# Altium integrated library StudentsLibrary.IntLib: 806 symbols (part 4 of 10)
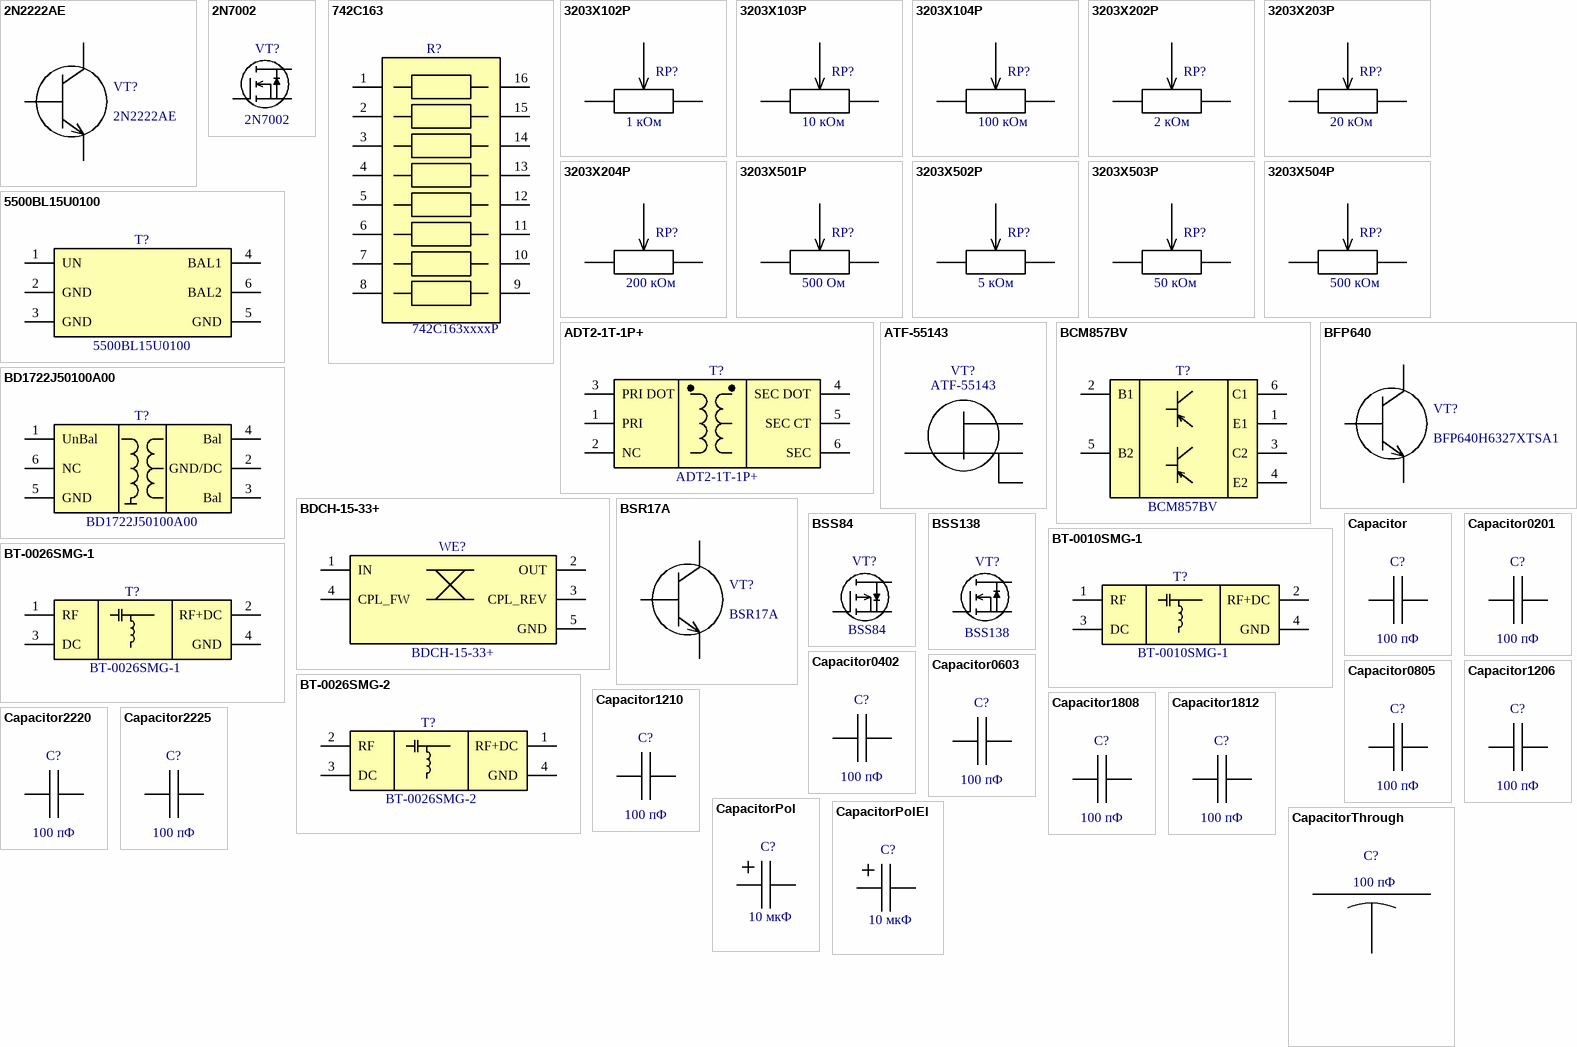
[diagram p50: symbols 2N2222AE to CapacitorThrough]

## Capacitor0603
designator C?, comment 100 пФ
Capacitor, chip, 0603; Value: 100 пФ; PartNumber: *; Tolerance: *; VDC: *; Dielectric: *; Manufacturer: *; Package: 0603
footprint CAPC160X80X90L30N (Capacitor, Chip; 1.60 mm L X 0.80 mm W X 0.90 mm H body)
pins: 1, 2

## Capacitor0805
designator C?, comment 100 пФ
Capacitor, chip, 0805; Value: 100 пФ; PartNumber: *; Tolerance: *; VDC: *; Dielectric: *; Manufacturer: *; Package: 0805
footprint CAPC200X125X95L50N (Capacitor, Chip; 2.00 mm L X 1.25 mm W X 0.95 mm H body)
pins: 1, 2

## Capacitor1206
designator C?, comment 100 пФ
Capacitor, chip, 1206; Value: 100 пФ; PartNumber: *; Tolerance: *; VDC: *; Dielectric: *; Manufacturer: *; Package: 1206
footprint CAPC320X160X180L20N (Capacitor, Chip; 3.20 mm L X 1.60 mm W X 1.80 mm H body)
pins: 1, 2

## Capacitor1210
designator C?, comment 100 пФ
Capacitor, chip, 1210; Value: 100 пФ; PartNumber: *; Tolerance: *; VDC: *; Dielectric: *; Manufacturer: *; Package: 1210
footprint CAPC320X250X280L20N (Capacitor, Chip; 3.20 mm L X 2.50 mm W X 2.80 mm H body)
pins: 1, 2

## Capacitor1808
designator C?, comment 100 пФ
Capacitor, chip, 1808; Value: 100 пФ; PartNumber: *; Tolerance: *; VDC: *; Dielectric: *; Manufacturer: *; Package: 1808
footprint CAPC470X200X115L60N (Capacitor, Chip; 4.70 mm L X 2.00 mm W X 1.15 mm H body)
pins: 1, 2

## Capacitor1812
designator C?, comment 100 пФ
Capacitor, chip, 1812; Value: 100 пФ; PartNumber: *; Tolerance: *; VDC: *; Dielectric: *; Manufacturer: *; Package: 1812
footprint CAPC450X320X360L20N (Capacitor, Chip; 4.50 mm L X 3.20 mm W X 3.60 mm H body)
pins: 1, 2

## Capacitor2220
designator C?, comment 100 пФ
Capacitor, chip, 2220; Value: 100 пФ; PartNumber: *; Tolerance: *; VDC: *; Dielectric: *; Manufacturer: *; Package: 2220
footprint CAPC570X500X310L20N (Capacitor, Chip; 5.70 mm L X 5.00 mm W X 3.10 mm H body)
pins: 1, 2

## Capacitor2225
designator C?, comment 100 пФ
Capacitor, chip, 2225; Value: 100 пФ; PartNumber: *; Tolerance: *; VDC: *; Dielectric: *; Manufacturer: *; Package: 2225
footprint CAPC560X640X155L60N (Capacitor, Chip; 5.60 mm L X 6.40 mm W X 1.55 mm H body)
pins: 1, 2

## CapacitorPol
designator C?, comment 10 мкФ
Capacitor, Pol, generic; Value: 10 мкФ; PartNumber: *; Tolerance: *; VDC: *; Manufacturer: *; Package: 1206; ESR: *
footprint CAPPM320X160X180L80X120N (Capacitor, Polarized, Molded Body; 2.60 mm L X 1.60 mm W X 1.80 mm H body)
footprint CAPPM350X280X210L80X220N (Capacitor, Polarized, Molded Body; 2.90 mm L X 2.80 mm W X 2.10 mm H body)
footprint CAPPM600X320X280L130X240N (Capacitor, Polarized, Molded Body; 5.80 mm L X 3.20 mm W X 2.80 mm H body)
footprint CAPPM730X430X310L130X240N (Capacitor, Polarized, Molded Body; 7.10 mm L X 4.30 mm W X 3.10 mm H body)
pins: 1, 2

## CapacitorPolEl
designator C?, comment 10 мкФ
Capacitor, Pol, El, generic; Value: 10 мкФ; PartNumber: *; Tolerance: *; VDC: *; Manufacturer: *; Package: *; ESR: *
footprint CAPAE430X600D510L205X65N (Capacitor, Aluminum Electrolytic; 4.30 mm L X 4.30 mm W X 6.00 mm H body)
footprint CAPAE530X600D590L220X65N (Capacitor, Aluminum Electrolytic; 5.30 mm L X 5.30 mm W X 6.00 mm H body)
footprint CAPAE840X680D840L305X65N (Capacitor, Aluminum Electrolytic; 8.40 mm L X 8.40 mm W X 6.80 mm H body)
footprint CAPAE1030X1050D1200L350X90N (Capacitor, Aluminum Electrolytic; 10.30 mm L X 10.30 mm W X 10.50 mm H body)
footprint CAPAE660X610L260X65 (Capacitor, Aluminum Electrolytic; 6.60 mm L X 6.60 mm W X 6.10 mm H body)
footprint CAPAE830X700D900L290X70N (Capacitor, Aluminum Electrolytic; 8.30 mm L X 8.30 mm W X 7.00 mm H body)
pins: 1, 2

## CapacitorThrough
designator C?, comment 100 пФ
Capacitor, through, 3-terminal; Value: 100 пФ; PartNumber: *; Tolerance: *; VDC: *; Dielectric: *; Manufacturer: *; Package: 0402
footprint CAPCAF4P0_100X50X50L15X35N (Chip Array, 4 Side Flat, 0.00 mm pitch; rect., 1 pin X 1 pin, 1.00 mm L X 0.50 mm W X 0.50 mm H body)
footprint CAPCAF4P0_120X90X80L20X50N (Chip Array, 4 Side Flat, 0.00 mm pitch; rect., 1 pin X 1 pin, 1.20 mm L X 0.90 mm W X 0.80 mm H body)
footprint CAPCAF4P0_160X80X70L20X40N (Chip Array, 4 Side Flat, 0.00 mm pitch; rect., 1 pin X 1 pin, 1.60 mm L X 0.80 mm W X 0.70 mm H body)
footprint CAPCAF4P0_200X125X95L25X60N (Chip Array, 4 Side Flat, 0.00 mm pitch; rect., 1 pin X 1 pin, 2.00 mm L X 1.25 mm W X 0.95 mm H body)
footprint CAPCAF4P0_320X160X150L30X110N (Chip Array, 4 Side Flat, 0.00 mm pitch; rect., 1 pin X 1 pin, 3.20 mm L X 1.60 mm W X 1.50 mm H body)
footprint CAPCAF4P0_450X160X120L35X150N (Chip Array, 4 Side Flat, 0.00 mm pitch; rect., 1 pin X 1 pin, 4.50 mm L X 1.60 mm W X 1.20 mm H body)
pins: 1, 2, 3

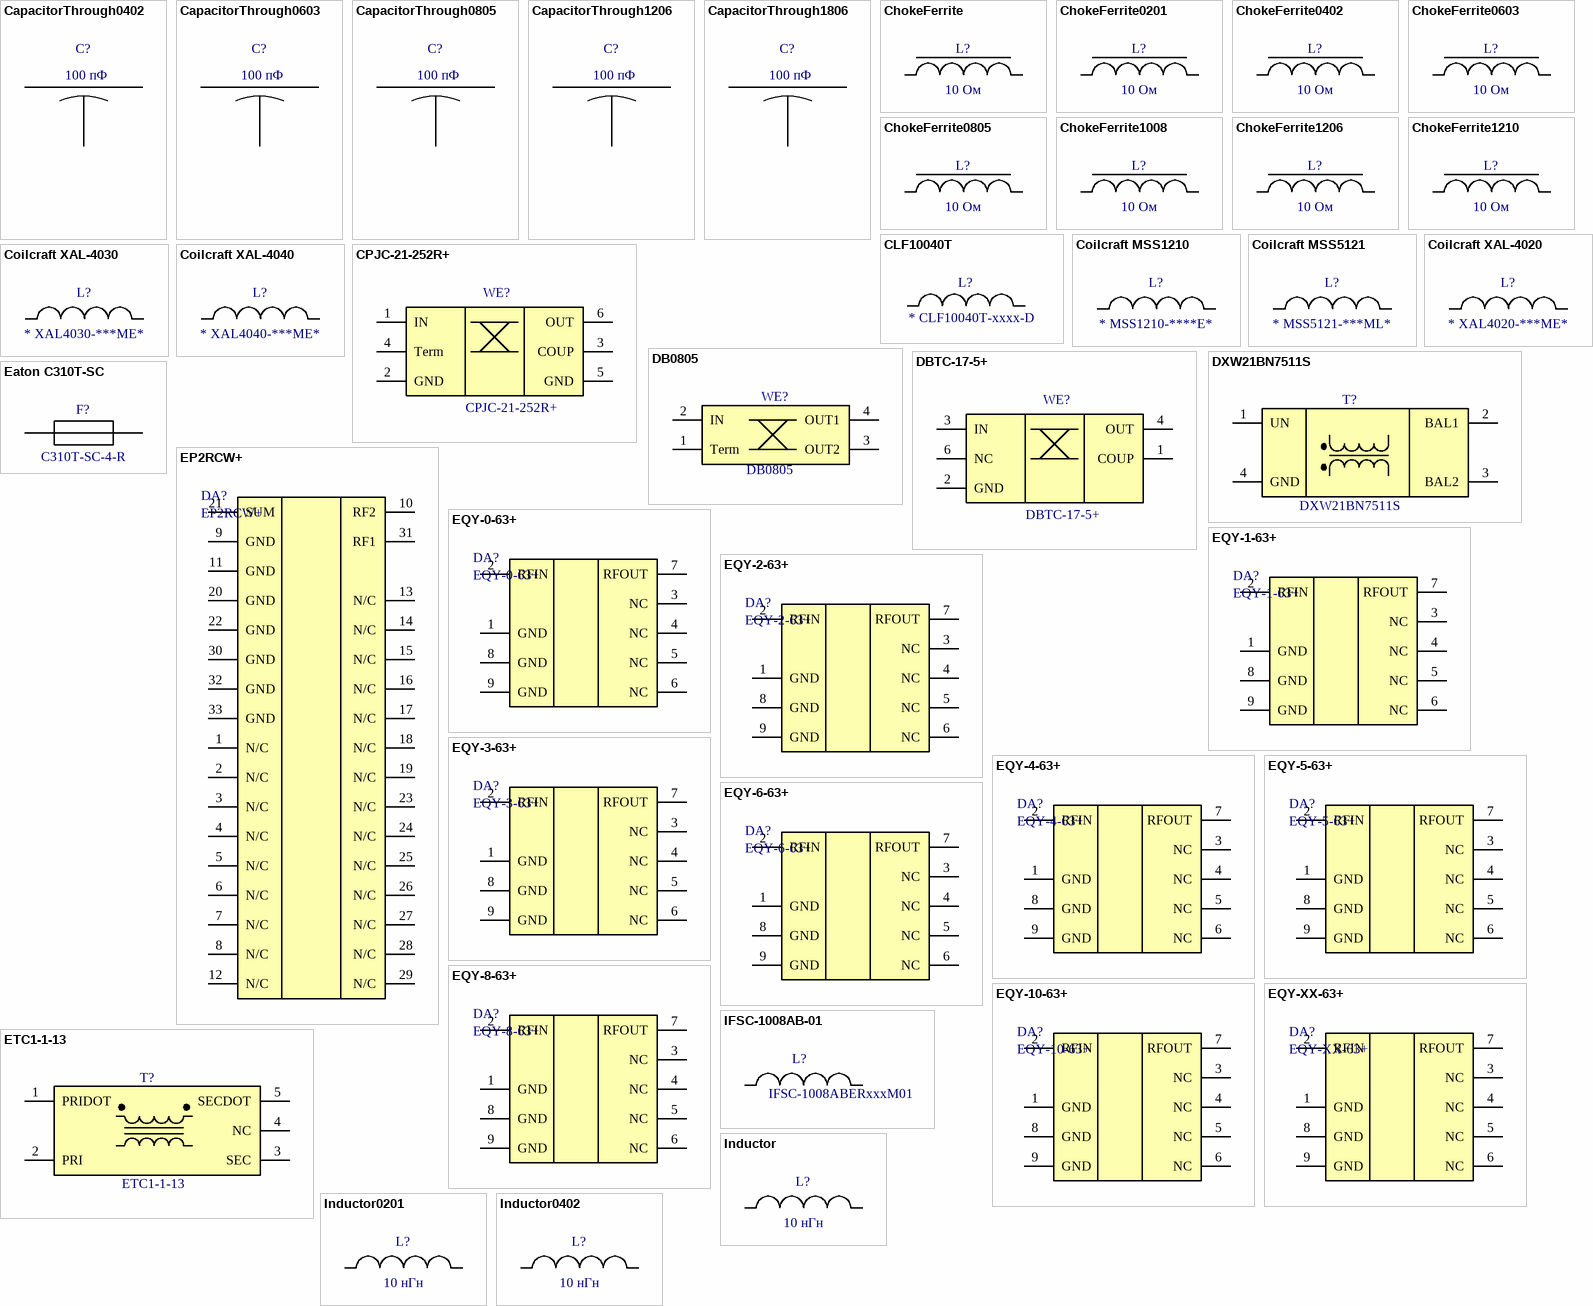
[diagram p12: symbols CapacitorThrough0402 to Inductor0402]

## CapacitorThrough0402
designator C?, comment 100 пФ
Capacitor, through, 3-terminal, 0402; Value: 100 пФ; PartNumber: *; Tolerance: *; VDC: *; Dielectric: *; Manufacturer: *; Package: 0402
footprint CAPCAF4P0_100X50X50L15X35N (Chip Array, 4 Side Flat, 0.00 mm pitch; rect., 1 pin X 1 pin, 1.00 mm L X 0.50 mm W X 0.50 mm H body)
pins: 1, 2, 3

## CapacitorThrough0603
designator C?, comment 100 пФ
Capacitor, through, 3-terminal, 0603; Value: 100 пФ; PartNumber: *; Tolerance: *; VDC: *; Dielectric: *; Manufacturer: *; Package: 0603
footprint CAPCAF4P0_160X80X70L20X40N (Chip Array, 4 Side Flat, 0.00 mm pitch; rect., 1 pin X 1 pin, 1.60 mm L X 0.80 mm W X 0.70 mm H body)
pins: 1, 2, 3

## CapacitorThrough0805
designator C?, comment 100 пФ
Capacitor, through, 3-terminal, 0805; Value: 100 пФ; PartNumber: *; Tolerance: *; VDC: *; Dielectric: *; Manufacturer: *; Package: 0805
footprint CAPCAF4P0_200X125X95L25X60N (Chip Array, 4 Side Flat, 0.00 mm pitch; rect., 1 pin X 1 pin, 2.00 mm L X 1.25 mm W X 0.95 mm H body)
pins: 1, 2, 3

## CapacitorThrough1206
designator C?, comment 100 пФ
Capacitor, through, 3-terminal, 1206; Value: 100 пФ; PartNumber: *; Tolerance: *; VDC: *; Dielectric: *; Manufacturer: *; Package: 1206
footprint CAPCAF4P0_320X160X150L30X110N (Chip Array, 4 Side Flat, 0.00 mm pitch; rect., 1 pin X 1 pin, 3.20 mm L X 1.60 mm W X 1.50 mm H body)
pins: 1, 2, 3

## CapacitorThrough1806
designator C?, comment 100 пФ
Capacitor, through, 3-terminal, 1806; Value: 100 пФ; PartNumber: *; Tolerance: *; VDC: *; Dielectric: *; Manufacturer: *; Package: 1806
footprint CAPCAF4P0_450X160X120L35X150N (Chip Array, 4 Side Flat, 0.00 mm pitch; rect., 1 pin X 1 pin, 4.50 mm L X 1.60 mm W X 1.20 mm H body)
pins: 1, 2, 3

## ChokeFerrite
designator L?, comment 10 Ом
Choke, Ferrite Core, SMD; Value: 10 Ом; PartNumber: *; Tolerance: *; DCR: *; IRMS: *; DCI: *; Manufacturer: *; Package: 0402
footprint BEADC60X30X33L10N (Ferrite Bead, Chip; 0.60 mm L X 0.30 mm W X 0.33 mm H body)
footprint BEADC100X50X55L20N (Ferrite Bead, Chip; 1.00 mm L X 0.50 mm W X 0.55 mm H body)
footprint BEADC160X80X100L30N (Ferrite Bead, Chip; 1.60 mm L X 0.80 mm W X 1.00 mm H body)
footprint BEADC200X125X105L50N (Ferrite Bead, Chip; 2.00 mm L X 1.25 mm W X 1.05 mm H body)
footprint BEADC250X200X100L50N (Ferrite Bead, Chip; 2.50 mm L X 2.00 mm W X 1.00 mm H body)
footprint BEADC320X160X180L70N (Ferrite Bead, Chip; 3.20 mm L X 1.60 mm W X 1.80 mm H body)
footprint BEADC320X250X170L70N (Ferrite Bead, Chip; 3.20 mm L X 2.50 mm W X 1.70 mm H body)
pins: 1, 2

## ChokeFerrite0201
designator L?, comment 10 Ом
Choke, Ferrite Core, SMD, 0201; Value: 10 Ом; PartNumber: *; Tolerance: *; DCR: *; IRMS: *; DCI: *; Manufacturer: *; Package: 0201
footprint BEADC60X30X33L10N (Ferrite Bead, Chip; 0.60 mm L X 0.30 mm W X 0.33 mm H body)
pins: 1, 2

## ChokeFerrite0402
designator L?, comment 10 Ом
Choke, Ferrite Core, SMD, 0402; Value: 10 Ом; PartNumber: *; Tolerance: *; DCR: *; IRMS: *; DCI: *; Manufacturer: *; Package: 0402
footprint BEADC100X50X55L20N (Ferrite Bead, Chip; 1.00 mm L X 0.50 mm W X 0.55 mm H body)
pins: 1, 2

## ChokeFerrite0603
designator L?, comment 10 Ом
Choke, Ferrite Core, SMD, 0603; Value: 10 Ом; PartNumber: *; Tolerance: *; DCR: *; IRMS: *; DCI: *; Manufacturer: *; Package: 0603
footprint BEADC160X80X100L30N (Ferrite Bead, Chip; 1.60 mm L X 0.80 mm W X 1.00 mm H body)
pins: 1, 2

## ChokeFerrite0805
designator L?, comment 10 Ом
Choke, Ferrite Core, SMD, 0805; Value: 10 Ом; PartNumber: *; Tolerance: *; DCR: *; IRMS: *; DCI: *; Manufacturer: *; Package: 0805
footprint BEADC200X125X105L50N (Ferrite Bead, Chip; 2.00 mm L X 1.25 mm W X 1.05 mm H body)
pins: 1, 2

## ChokeFerrite1008
designator L?, comment 10 Ом
Choke, Ferrite Core, SMD, 1008; Value: 10 Ом; PartNumber: *; Tolerance: *; DCR: *; IRMS: *; DCI: *; Manufacturer: *; Package: 1008
footprint BEADC250X200X100L50N (Ferrite Bead, Chip; 2.50 mm L X 2.00 mm W X 1.00 mm H body)
pins: 1, 2

## ChokeFerrite1206
designator L?, comment 10 Ом
Choke, Ferrite Core, SMD, 1206; Value: 10 Ом; PartNumber: *; Tolerance: *; DCR: *; IRMS: *; DCI: *; Manufacturer: *; Package: 1206
footprint BEADC320X160X180L70N (Ferrite Bead, Chip; 3.20 mm L X 1.60 mm W X 1.80 mm H body)
pins: 1, 2

## ChokeFerrite1210
designator L?, comment 10 Ом
Choke, Ferrite Core, SMD, 1210; Value: 10 Ом; PartNumber: *; Tolerance: *; DCR: *; IRMS: *; DCI: *; Manufacturer: *; Package: 1210
footprint BEADC320X250X170L70N (Ferrite Bead, Chip; 3.20 mm L X 2.50 mm W X 1.70 mm H body)
pins: 1, 2

## CLF10040T
designator L?, comment * CLF10040T-xxxx-D
Inductors for power circuits, Wound ferrite, CLF-D series (for automotive); Manufacturer: Coilcraft; Value: *; Tolerance: *; DCR: *; ISAT: *; IRMS: *; PartNumber: CLF10040T-xxxx-D
footprint COILCRAFT_CLF10040-D (Coilcraft 10x9.7x3.8 shileded inductor)
pins: 1, 2

## Coilcraft MSS1210
designator L?, comment * MSS1210-****E*
Coilcraft Shielded Power Inductors, 12.3x12.3x10; Value: *; PartNumber: MSS1210-****E*; Tolerance: *; DCR: *; IRMS: *; ISAT: *; SRF: *; Manufacturer: Coilcraft
footprint COILCRAFT_MSS1210 (Coilcraft Shielded Power Inductors, 12.3x12.3x10)
pins: 1, 2

## Coilcraft MSS5121
designator L?, comment * MSS5121-***ML*
MSS5121 Series Shielded Surface Mount Power Inductors, 5.1x5.1x2.2; Manufacturer: Coilcraft; Tolerance: ±20%; Value: *; PartNumber: MSS5121-***ML*; DCR: *; IRMS: *; ISAT: *; SRF: *
footprint Coilcraft MSS5121 (MSS5121 Series Shielded Surface Mount Power Inductors, 5.1x5.1x2.2)
pins: 1, 2

## Coilcraft XAL-4020
designator L?, comment * XAL4020-***ME*
Coilcraft Shielded Power Inductor, 4x4x2; Tolerance: ±20%; Value: *; PartNumber: XAL4020-***ME*; DCR: *; IRMS: *; ISAT: *; SRF: *; Manufacturer: Coilcraft
footprint COILCRAFT_XAL4020 (Coilcraft Power Inductor, 4x4x2)
pins: 1, 2

## Coilcraft XAL-4030
designator L?, comment * XAL4030-***ME*
Coilcraft Shielded Power Inductor, 4x4x3; Tolerance: ±20%; Value: *; PartNumber: XAL4030-***ME*; DCR: *; IRMS: *; ISAT: *; SRF: *; Manufacturer: Coilcraft
footprint COILCRAFT_XAL4030 (Coilcraft Power Inductor, 4x4x3)
pins: 1, 2

## Coilcraft XAL-4040
designator L?, comment * XAL4040-***ME*
Coilcraft Shielded Power Inductor, 4x4x4; Tolerance: ±20%; Value: *; PartNumber: XAL4040-***ME*; DCR: *; IRMS: *; ISAT: *; SRF: *; Manufacturer: Coilcraft
footprint COILCRAFT_XAL4040 (Coilcraft Power Inductor, 4x4x4)
pins: 1, 2

## CPJC-21-252R+
designator WE?
Directional Coupler 50Ω, 17dB coupling, 50 to 2000 MHz; Manufacturer: Mini-Circuits; PartNumber: CPJC-21-252R+; ComponentLink1Description: Product Page; ComponentLink1URL: https://www.minicircuits.com/WebStore/dashboard.html?model=CPJC-21-252R%2B; ComponentLink2Description: DataSheet; ComponentLink2URL: https://www.minicircuits.com/WebStore/dashboardPdf?model=CPJC-21-252R%2B
footprint JC0603C (Mini-Circuits CASE JC0603C)
pins: 1 IN, 2 GND, 3 COUP, 4 Term, 5 GND, 6 OUT

## DB0805
designator WE?
Thin-Film Directional Coupler 3dB 90°; Manufacturer: Kyocera AVX; PartNumber: DB0805; ComponentLink1Description: Product Page; ComponentLink1URL: https://www.kyocera-avx.com/products/rfmicrowave/couplers/db0805/
footprint AVXRF DB0805 (AVX RF case DB0805)
pins: 1 Term, 2 IN, 3 OUT2, 4 OUT1

## DBTC-17-5+
designator WE?
Directional Coupler 50Ω, 17dB coupling, 50 to 2000 MHz; Manufacturer: Mini-Circuits; PartNumber: DBTC-17-5+; ComponentLink1Description: Product Page; ComponentLink1URL: https://www.minicircuits.com/WebStore/dashboard.html?model=DBTC-17-5%2B; ComponentLink2Description: DataSheet; ComponentLink2URL: https://www.minicircuits.com/WebStore/dashboardPdf?model=DBTC-17-5%2B
footprint AT790-1 (Mini-Circuirts case AT790-1)
pins: 1 COUP, 2 GND, 3 IN, 4 OUT, 6 NC

## DXW21BN7511S
designator T?
Ultra miniature size and wire wound type microchip / transformer. 2.0x1.2x1.2mm; Manufacturer: Murata; PartNumber: DXW21BN7511S; ComponentLink1Description: ProductPage; ComponentLink1URL: https://www.murata.com/en-eu/products/productdetail?partno=DXW21BN7511S%23; ComponentLink2Description: DataSheet; ComponentLink2URL: https://www.murata.com/products/productdata/8796776267806/EFKA0001.pdf?1655782219000
footprint DXW21BN7511S (Murata 2012 4-terminal)
pins: 1 UN, 2 BAL1, 3 BAL2, 4 GND

## Eaton C310T-SC
designator F?, comment C310T-SC-4-R
Fuse Subminiature Slow Blow Acting 4A 250V Axial 3.6 X 10mm Ceramic; Manufacturer: Eaton; PartNumber: C310T-SC-4-R; ComponentLink1Description: Product Page; ComponentLink1URL: https://www.eaton.com/gb/en-gb/catalog/electronic-components/c310t-sc-fuse.specifications.html
footprint EATON C310T-SC (3.6 mm x 10 mm pitch 13.5 mm)
pins: 1, 2

## EP2RCW+
designator DA?
2 Ways MMIC Power Splitter, DC - 8000 MHz, 50Ω; Manufacturer: Mini-Circuits; PartNumber: EP2RCW+; ComponentLink1Description: Product Page; ComponentLink1URL: https://www.minicircuits.com/WebStore/dashboard.html?model=EP2RCW%2B; ComponentLink2Description: DataSheet; ComponentLink2URL: https://www.minicircuits.com/WebStore/dashboardPdf?model=EP2RCW%2B
footprint QFN33P50_500X500X100L40X24T380N (Quad Flat No-Lead (QFN with Tab), 0.50 mm pitch; square, 8 pin X 8 pin, 5.00 mm L X 5.00 mm W X 1.00 mm H body)
pins: 1 N/C, 2 N/C, 3 N/C, 4 N/C, 5 N/C, 6 N/C, 7 N/C, 8 N/C, 9 GND, 10 RF2, 11 GND, 12 N/C, 13 N/C, 14 N/C, 15 N/C, 16 N/C, 17 N/C, 18 N/C, 19 N/C, 20 GND, 21 SUM, 22 GND, 23 N/C, 24 N/C, 25 N/C, 26 N/C, 27 N/C, 28 N/C, 29 N/C, 30 GND, 31 RF1, 32 GND, 33 GND

## EQY-0-63+
designator DA?
-0.1 dB SMT Fixed Slope Equalizer, DC - 6000 MHz; Manufacturer: Mini-Circuits; PartNumber: EQY-0-63+; ComponentLink2Description: DataSheet; ComponentLink1Description: Product Page; ComponentLink1URL: https://www.minicircuits.com/WebStore/dashboard.html?model=EQY-0-63%2B; ComponentLink2URL: https://www.minicircuits.com/WebStore/dashboardPdf?model=EQY-0-63%2B
footprint SON9P50_200X200X100L35X23T120X60N (Small Outline No-Lead (SON with Tab), 0.50 mm pitch; 8 pin, 2.00 mm L X 2.00 mm W X 1.00 mm H body)
pins: 1 GND, 2 RFIN, 3 NC, 4 NC, 5 NC, 6 NC, 7 RFOUT, 8 GND, 9 GND

## EQY-1-63+
designator DA?
1.2 dB SMT Fixed Slope Equalizer, DC - 6000 MHz; Manufacturer: Mini-Circuits; PartNumber: EQY-1-63+; ComponentLink2Description: DataSheet; ComponentLink1Description: Product Page; ComponentLink1URL: https://www.minicircuits.com/WebStore/dashboard.html?model=EQY-1-63%2B; ComponentLink2URL: https://www.minicircuits.com/WebStore/dashboardPdf?model=EQY-1-63%2B
footprint SON9P50_200X200X100L35X23T120X60N (Small Outline No-Lead (SON with Tab), 0.50 mm pitch; 8 pin, 2.00 mm L X 2.00 mm W X 1.00 mm H body)
pins: 1 GND, 2 RFIN, 3 NC, 4 NC, 5 NC, 6 NC, 7 RFOUT, 8 GND, 9 GND

## EQY-2-63+
designator DA?
2.1 dB SMT Fixed Slope Equalizer, DC - 6000 MHz; Manufacturer: Mini-Circuits; PartNumber: EQY-2-63+; ComponentLink2Description: DataSheet; ComponentLink1Description: Product Page; ComponentLink1URL: https://www.minicircuits.com/WebStore/dashboard.html?model=EQY-2-63%2B; ComponentLink2URL: https://www.minicircuits.com/WebStore/dashboardPdf?model=EQY-2-63%2B
footprint SON9P50_200X200X100L35X23T120X60N (Small Outline No-Lead (SON with Tab), 0.50 mm pitch; 8 pin, 2.00 mm L X 2.00 mm W X 1.00 mm H body)
pins: 1 GND, 2 RFIN, 3 NC, 4 NC, 5 NC, 6 NC, 7 RFOUT, 8 GND, 9 GND

## EQY-3-63+
designator DA?
3.2 dB SMT Fixed Slope Equalizer, DC - 6000 MHz; Manufacturer: Mini-Circuits; PartNumber: EQY-3-63+; ComponentLink2Description: DataSheet; ComponentLink1Description: Product Page; ComponentLink1URL: https://www.minicircuits.com/WebStore/dashboard.html?model=EQY-3-63%2B; ComponentLink2URL: https://www.minicircuits.com/WebStore/dashboardPdf?model=EQY-3-63%2B
footprint SON9P50_200X200X100L35X23T120X60N (Small Outline No-Lead (SON with Tab), 0.50 mm pitch; 8 pin, 2.00 mm L X 2.00 mm W X 1.00 mm H body)
pins: 1 GND, 2 RFIN, 3 NC, 4 NC, 5 NC, 6 NC, 7 RFOUT, 8 GND, 9 GND

## EQY-4-63+
designator DA?
4.2 dB SMT Fixed Slope Equalizer, DC - 6000 MHz; Manufacturer: Mini-Circuits; PartNumber: EQY-4-63+; ComponentLink2Description: DataSheet; ComponentLink1Description: Product Page; ComponentLink1URL: https://www.minicircuits.com/WebStore/dashboard.html?model=EQY-4-63%2B; ComponentLink2URL: https://www.minicircuits.com/WebStore/dashboardPdf?model=EQY-4-63%2B
footprint SON9P50_200X200X100L35X23T120X60N (Small Outline No-Lead (SON with Tab), 0.50 mm pitch; 8 pin, 2.00 mm L X 2.00 mm W X 1.00 mm H body)
pins: 1 GND, 2 RFIN, 3 NC, 4 NC, 5 NC, 6 NC, 7 RFOUT, 8 GND, 9 GND

## EQY-5-63+
designator DA?
5 dB SMT Fixed Slope Equalizer, DC - 6000 MHz; Manufacturer: Mini-Circuits; PartNumber: EQY-5-63+; ComponentLink2Description: DataSheet; ComponentLink1Description: Product Page; ComponentLink1URL: https://www.minicircuits.com/WebStore/dashboard.html?model=EQY-5-63%2B; ComponentLink2URL: https://www.minicircuits.com/WebStore/dashboardPdf?model=EQY-5-63%2B
footprint SON9P50_200X200X100L35X23T120X60N (Small Outline No-Lead (SON with Tab), 0.50 mm pitch; 8 pin, 2.00 mm L X 2.00 mm W X 1.00 mm H body)
pins: 1 GND, 2 RFIN, 3 NC, 4 NC, 5 NC, 6 NC, 7 RFOUT, 8 GND, 9 GND

## EQY-6-63+
designator DA?
6.5 dB SMT Fixed Slope Equalizer, DC - 6000 MHz; Manufacturer: Mini-Circuits; PartNumber: EQY-6-63+; ComponentLink2Description: DataSheet; ComponentLink1Description: Product Page; ComponentLink1URL: https://www.minicircuits.com/WebStore/dashboard.html?model=EQY-6-63%2B; ComponentLink2URL: https://www.minicircuits.com/WebStore/dashboardPdf?model=EQY-6-63%2B
footprint SON9P50_200X200X100L35X23T120X60N (Small Outline No-Lead (SON with Tab), 0.50 mm pitch; 8 pin, 2.00 mm L X 2.00 mm W X 1.00 mm H body)
pins: 1 GND, 2 RFIN, 3 NC, 4 NC, 5 NC, 6 NC, 7 RFOUT, 8 GND, 9 GND

## EQY-8-63+
designator DA?
8.2 dB SMT Fixed Slope Equalizer, DC - 6000 MHz; Manufacturer: Mini-Circuits; PartNumber: EQY-8-63+; ComponentLink2Description: DataSheet; ComponentLink1Description: Product Page; ComponentLink1URL: https://www.minicircuits.com/WebStore/dashboard.html?model=EQY-8-63%2B; ComponentLink2URL: https://www.minicircuits.com/WebStore/dashboardPdf?model=EQY-8-63%2B
footprint SON9P50_200X200X100L35X23T120X60N (Small Outline No-Lead (SON with Tab), 0.50 mm pitch; 8 pin, 2.00 mm L X 2.00 mm W X 1.00 mm H body)
pins: 1 GND, 2 RFIN, 3 NC, 4 NC, 5 NC, 6 NC, 7 RFOUT, 8 GND, 9 GND

## EQY-10-63+
designator DA?
10.2 dB SMT Fixed Slope Equalizer, DC - 6000 MHz; Manufacturer: Mini-Circuits; PartNumber: EQY-10-63+; ComponentLink2Description: DataSheet; ComponentLink1Description: Product Page; ComponentLink1URL: https://www.minicircuits.com/WebStore/dashboard.html?model=EQY-10-63%2B; ComponentLink2URL: https://www.minicircuits.com/WebStore/dashboardPdf?model=EQY-10-63%2B
footprint SON9P50_200X200X100L35X23T120X60N (Small Outline No-Lead (SON with Tab), 0.50 mm pitch; 8 pin, 2.00 mm L X 2.00 mm W X 1.00 mm H body)
pins: 1 GND, 2 RFIN, 3 NC, 4 NC, 5 NC, 6 NC, 7 RFOUT, 8 GND, 9 GND

## EQY-XX-63+
designator DA?
Gain Equalizers, 50Ω, DC to 6 GHz, Slope 0,1,2,3,4,5,6,8&10 dB; Manufacturer: Mini-Circuits; PartNumber: EQY-XX-63+; ComponentLink1Description: Mini-Circuits equalizers page; ComponentLink1URL: https://www.minicircuits.com/WebStore/equalizers.html#; ComponentLink2Description: DataSheet
footprint SON9P50_200X200X100L35X23T120X60N (Small Outline No-Lead (SON with Tab), 0.50 mm pitch; 8 pin, 2.00 mm L X 2.00 mm W X 1.00 mm H body)
pins: 1 GND, 2 RFIN, 3 NC, 4 NC, 5 NC, 6 NC, 7 RFOUT, 8 GND, 9 GND

## ETC1-1-13
designator T?
E-Series Transformer, RF 1:1 Transmission Line 4.5 -3000 MHz; Manufacturer: MACOM; PartNumber: ETC1-1-13; ComponentLink1Description: Product Page; ComponentLink1URL: https://www.macom.com/products/product-detail/ETC1-1-13
footprint ETC1-1-13 (MACOM ETC1-1-13)
pins: 1 PRIDOT, 2 PRI, 3 SEC, 4 NC, 5 SECDOT

## IFSC-1008AB-01
designator L?, comment IFSC-1008ABERxxxM01
Low Profile, High Current Inductors; Manufacturer: Vishay; Tolerance: ±20%; PartNumber: IFSC-1008ABERxxxM01; Value: *; DCR: *; ISAT: *; ComponentLink1Description: Product Page; ComponentLink1URL: https://www.vishay.com/en/product/34294/; Package: 1008
footprint VISHAY IFSC-1008AB-01 (VISHAY Low Profile Inductor, 2x2.5)
pins: 1, 2

## Inductor
designator L?, comment 10 нГн
Inductor, generic; Value: 10 нГн; PartNumber: *; Tolerance: *; DCR: *; IRMS: *; ISAT: *; SRF: *; Q: *; Manufacturer: *; Package: 0603
footprint INDC60X30X33L15N (Inductor, Chip; 0.60 mm L X 0.30 mm W X 0.33 mm H body)
footprint INDC100X50X55L20N (Inductor, Chip; 1.00 mm L X 0.50 mm W X 0.55 mm H body)
footprint INDC160X80X100L30N (Inductor, Chip; 1.60 mm L X 0.80 mm W X 1.00 mm H body)
footprint INDC200X120X140L50N (Inductor, Chip; 2.00 mm L X 1.20 mm W X 1.40 mm H body)
footprint INDC250X200X100L60N (Inductor, Chip; 2.50 mm L X 2.00 mm W X 1.00 mm H body)
footprint INDC320X160X130L50N (Inductor, Chip; 3.20 mm L X 1.60 mm W X 1.30 mm H body)
footprint INDC320X250X220L90N (Inductor, Chip; 3.20 mm L X 2.50 mm W X 2.20 mm H body)
footprint INDC450X320X300L70N (Inductor, Chip; 4.50 mm L X 3.20 mm W X 3.00 mm H body)
pins: 1, 2

## Inductor0201
designator L?, comment 10 нГн
Inductor, chip, 0201; Value: 10 нГн; PartNumber: *; Tolerance: *; DCR: *; IRMS: *; ISAT: *; SRF: *; Q: *; Manufacturer: *; Package: 0201
footprint INDC60X30X33L15N (Inductor, Chip; 0.60 mm L X 0.30 mm W X 0.33 mm H body)
pins: 1, 2

## Inductor0402
designator L?, comment 10 нГн
Inductor, chip, 0402; Value: 10 нГн; PartNumber: *; Tolerance: *; DCR: *; IRMS: *; ISAT: *; SRF: *; Q: *; Manufacturer: *; Package: 0402
footprint INDC100X50X55L20N (Inductor, Chip; 1.00 mm L X 0.50 mm W X 0.55 mm H body)
pins: 1, 2

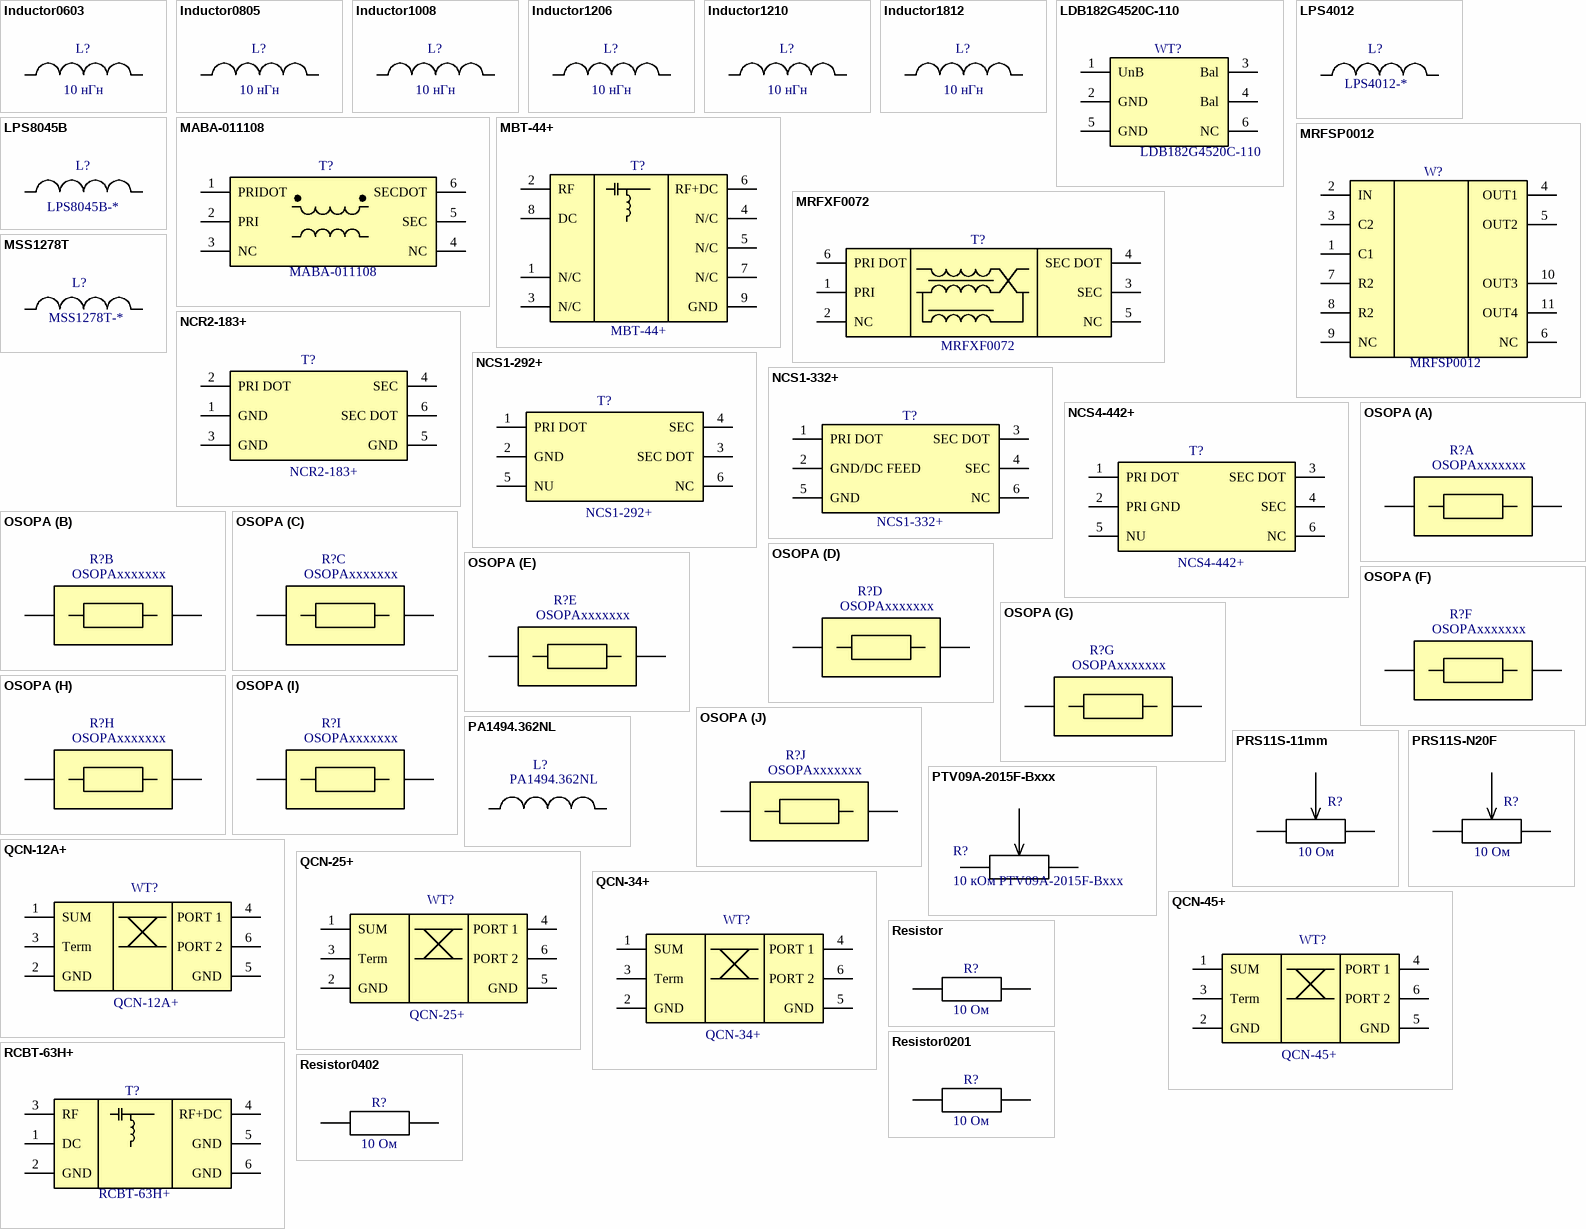
[diagram p13: symbols Inductor0603 to Resistor0402]

## Inductor0603
designator L?, comment 10 нГн
Inductor, chip, 0603; Value: 10 нГн; PartNumber: *; Tolerance: *; DCR: *; IRMS: *; ISAT: *; SRF: *; Q: *; Manufacturer: *; Package: 0603
footprint INDC160X80X100L30N (Inductor, Chip; 1.60 mm L X 0.80 mm W X 1.00 mm H body)
pins: 1, 2

## Inductor0805
designator L?, comment 10 нГн
Inductor, chip, 0805; Value: 10 нГн; PartNumber: *; Tolerance: *; DCR: *; IRMS: *; ISAT: *; SRF: *; Q: *; Manufacturer: *; Package: 0805
footprint INDC200X120X140L50N (Inductor, Chip; 2.00 mm L X 1.20 mm W X 1.40 mm H body)
pins: 1, 2

## Inductor1008
designator L?, comment 10 нГн
Inductor, chip, 0805; Value: 10 нГн; PartNumber: *; Tolerance: *; DCR: *; IRMS: *; ISAT: *; SRF: *; Q: *; Manufacturer: *; Package: 1008
footprint INDC250X200X100L60N (Inductor, Chip; 2.50 mm L X 2.00 mm W X 1.00 mm H body)
pins: 1, 2

## Inductor1206
designator L?, comment 10 нГн
Inductor, chip, 1206; Value: 10 нГн; PartNumber: *; Tolerance: *; DCR: *; IRMS: *; ISAT: *; SRF: *; Q: *; Manufacturer: *; Package: 1206
footprint INDC320X160X130L50N (Inductor, Chip; 3.20 mm L X 1.60 mm W X 1.30 mm H body)
pins: 1, 2

## Inductor1210
designator L?, comment 10 нГн
Inductor, chip, 1210; Value: 10 нГн; PartNumber: *; Tolerance: *; DCR: *; IRMS: *; ISAT: *; SRF: *; Q: *; Manufacturer: *; Package: 1210
footprint INDC320X250X220L90N (Inductor, Chip; 3.20 mm L X 2.50 mm W X 2.20 mm H body)
pins: 1, 2

## Inductor1812
designator L?, comment 10 нГн
Inductor, chip, 1812; Value: 10 нГн; PartNumber: *; Tolerance: *; DCR: *; IRMS: *; ISAT: *; SRF: *; Q: *; Manufacturer: *; Package: 1812
footprint INDC450X320X300L70N (Inductor, Chip; 4.50 mm L X 3.20 mm W X 3.00 mm H body)
pins: 1, 2

## LDB182G4520C-110
designator WT?
Chip Multilayer Hybrid Balun 2450.0 ±50.0MHz 50-200 Ohm; Manufacturer: Murata; PartNumber: LDB182G4520C-110
footprint ICCAF6P50_160X80X70L15X20N (Chip Array, 2 Side Flat, 0.50 mm pitch; 6 pin, 1.60 mm L X 0.80 mm W X 0.70 mm H body)
pins: 1 UnB, 2 GND, 3 Bal, 4 Bal, 5 GND, 6 NC

## LPS4012
designator L?, comment LPS4012-*
Low Profile Shielded Power Inductors; Manufacturer: Coilcraft; PartNumber: LPS4012-*; Value: *; DCR: *; SRF: *; ISAT: *; ComponentLink1Description: Product Page; ComponentLink1URL: https://www.coilcraft.com/en-us/products/power/shielded-inductors/ferrite-drum/lps/lps4012/?skuId=4989|8628; Tolerance: *; IRMS: *
footprint LPS4012 (Coilcraft LPS4012- series)
pins: 1, 2

## LPS8045B
designator L?, comment LPS8045B-*
Shielded Power Inductor; Manufacturer: Coilcraft; Value: 10 мкГн; Tolerance: ±20%; PartNumber: LPS8045B-*; DCR: *; SRF: *; ISAT: *; ComponentLink1Description: Product Page; ComponentLink1URL: https://www.coilcraft.com/en-us/products/power/shielded-inductors/ferrite-drum/lps/lps8045b/; IRMS: *
footprint COILCRAFT_LPS8045B (Coilcraft LPS8045B)
pins: 1, 2

## MABA-011108
designator T?
1:1 Transmission Line Balun 5 MHz - 10GHz; Manufacturer: MACOM; PartNumber: MABA-011108; ComponentLink1Description: Product Page; ComponentLink1URL: https://www.macom.com/products/product-detail/MABA-011108
footprint MABA-011108 (MA-COM 3.81X3.81X3.22 6-pin)
pins: 1 PRIDOT, 2 PRI, 3 NC, 4 NC, 5 SEC, 6 SECDOT

## MBT-44+
designator T?
MMIC WIDEBAND Bias Tee 50Ω 10 to 40 GHz; Manufacturer: Mini-Circuits; PartNumber: MBT-44+; ComponentLink1Description: Product Page; ComponentLink1URL: https://www.minicircuits.com/WebStore/dashboard.html?model=MBT-44%2B; ComponentLink2Description: DataSheet; ComponentLink2URL: https://www.minicircuits.com/WebStore/dashboardPdf?model=MBT-44%2B
footprint JV3002 (Mini-Circuits case JV3002)
pins: 1 N/C, 2 RF, 3 N/C, 4 N/C, 5 N/C, 6 RF+DC, 7 N/C, 8 DC, 9 GND

## MRFSP0012
designator W?
4-Way Splitter 5 to 1002 MHz; Manufacturer: MiniRF; PartNumber: MRFSP0012; ComponentLink1Description: ProductPage; ComponentLink1URL: https://www.rfmw.com/products/detail/mrfsp0012-minirf/465633/; ComponentLink2Description: DataSheet; ComponentLink2URL: http://www.minirf.com/pdf/splitters/MRFSP0012.pdf
footprint MRFSP0012 (MRFSP0012 Packadge S25)
pins: 1 C1, 2 IN, 3 C2, 4 OUT1, 5 OUT2, 6 NC, 7 R2, 8 R2, 9 NC, 10 OUT3, 11 OUT4

## MRFXF0072
designator T?
1:1 SMT TRANSFORMER 75 Ohm; Manufacturer: MiniRF; PartNumber: MRFXF0072; ComponentLink1Description: Product Page; ComponentLink1URL: https://www.rfmw.com/products/detail/mrfxf0072-minirf/701862/; ComponentLink2Description: DataSheet; ComponentLink2URL: http://minirf.com/images/MRFXF0072.pdf
footprint MiniRF CASE S-18D (6 pin, 2.54 pitch, 7.11 x 6.35 x 3.18)
pins: 1 PRI, 2 NC, 3 SEC, 4 SEC DOT, 5 NC, 6 PRI DOT

## MSS1278T
designator L?, comment MSS1278T-*
Colicraft SMT Power Inductors; Manufacturer: Coilcraft; PartNumber: MSS1278T-*; Value: *; DCR: *; SRF: *; ISAT: *; ComponentLink1Description: Product Page; ComponentLink1URL: https://www.coilcraft.com/en-us/products/power/shielded-inductors/ferrite-drum/mss-mos/mss1278t/; IRMS: *; Tolerance: *
footprint MSS1278T (Coilcraft MSS1278T Series)
pins: 1, 2

## NCR2-183+
designator T?
RF Transformer; Manufacturer: Mini-Circuits; PartNumber: NCR2-183+; ComponentLink1Description: Product Page; ComponentLink1URL: https://www.minicircuits.com/WebStore/dashboard.html?model=NCR2-183%2B; ComponentLink2Description: DataSheet; ComponentLink2URL: https://www.minicircuits.com/WebStore/dashboardPdf?model=NCR2-183%2B
footprint NF1846-1 (Mini-Circuits case NF1846-1)
pins: 1 GND, 2 PRI DOT, 3 GND, 4 SEC, 5 GND, 6 SEC DOT

## NCS1-292+
designator T?
RF Transformer; Manufacturer: Mini-Circuits; PartNumber: NCS1-292+; ComponentLink1Description: Product Page; ComponentLink1URL: https://www.minicircuits.com/WebStore/dashboard.html?model=NCS1-292%2B; ComponentLink2Description: DataSheet; ComponentLink2URL: https://www.minicircuits.com/WebStore/dashboardPdf?model=NCS1-292%2B
footprint GE0805C-1 (Mini-Circuits case GE0805C-1)
pins: 1 PRI DOT, 2 GND, 3 SEC DOT, 4 SEC, 5 NU, 6 NC

## NCS1-332+
designator T?
RF Transformer, 50Ω 700 to 3300, MHz 1:1 Ratio; Manufacturer: Mini-Circuits; PartNumber: NCS1-332+; ComponentLink1Description: Product Page; ComponentLink1URL: https://www.minicircuits.com/WebStore/dashboard.html?model=NCS1-332%2B; ComponentLink2Description: DataSheet; ComponentLink2URL: https://www.minicircuits.com/WebStore/dashboardPdf?model=NCS1-332%2B
footprint GE0805C-9 (Mini-Circuits case GE0805C-9)
pins: 1 PRI DOT, 2 GND/DC FEED, 3 SEC DOT, 4 SEC, 5 GND, 6 NC

## NCS4-442+
designator T?
RF Transformer 50Ω 3300 to 4200 MHz 1:4 Ratio; Manufacturer: Mini-Circuits; PartNumber: NCS4-442+; ComponentLink1Description: Product Page; ComponentLink1URL: https://www.minicircuits.com/WebStore/dashboard.html?model=NCS4-442%2B; ComponentLink2Description: DataSheet; ComponentLink2URL: https://www.minicircuits.com/WebStore/dashboardPdf?model=NCS4-442%2B
footprint GE0805C-1 (Mini-Circuits case GE0805C-1)
pins: 1 PRI DOT, 2 PRI GND, 3 SEC DOT, 4 SEC, 5 NU, 6 NC

## OSOPA
designator R?, comment OSOPAxxxxxxx
Dual-In-Line Thin Film Resistor,  Surface Mount Network, Isolated; Manufacturer: Vishay; PartNumber: OSOPAxxxxxxx; Value: *; Tolerance: *; Power: *; DCV: *; ComponentLink1Description: Product Page; ComponentLink1URL: https://www.vishay.com/en/product/60002/; ComponentLink2Description: DataSheet; ComponentLink2URL: https://www.vishay.com/docs/60002/osop.pdf
footprint SOP20P63_866X602X173L64X25N (Small Outline Pkg (SOP), 0.635 mm pitch; 20 pin, 8.66 mm L X 3.91 mm W X 1.73 mm H body)
part A pins: 1, 20
part B pins: 2, 19
part C pins: 3, 18
part D pins: 4, 17
part E pins: 5, 16
part F pins: 6, 15
part G pins: 7, 14
part H pins: 8, 13
part I pins: 9, 12
part J pins: 10, 11

## PA1494.362NL
designator L?
SMT POWER INDUCTOR Planar - PA1X9XNL Series; Manufacturer: Pulse; Value: 3,3 мкГн; PartNumber: PA1494.362NL; Tolerance: *; DCR: *; IRMS: *; ISAT: *; SRF: *; Q: *; ComponentLink1Description: Product Page; ComponentLink1URL: https://productfinder.pulseelectronics.com/part/pa1494.362nlt; ComponentLink2Description: DataSheet; ComponentLink2URL: https://productfinder.pulseelectronics.com/api/open/part-attachments/datasheet/pa1494.362nlt
footprint PA1494 (Pulse Planar inductor)
pins: 1, 2

## PRS11S-11mm
designator R?, comment 10 Ом
11 mm SMD Potentiometer; PartNumber: PRS11S-*; Manufacturer: Bourns; Value: 10 Ом; ComponentLink1Description: DataSheet; ComponentLink1URL: https://www.bourns.com/data/global/pdfs/PRS11S.pdf
footprint PRS11S-11mm (Bourns 11 mm SMD Potentiometer with Mounting Holes)
pins: 1, 2, 3

## PRS11S-N20F
designator R?, comment 10 Ом
PRS11S - 11 mm SMD Potentiometer; PartNumber: PRS11S-N20F; Manufacturer: Bourns; Value: 10 Ом; ComponentLink1Description: DataSheet; ComponentLink1URL: https://www.bourns.com/data/global/pdfs/PRS11S.pdf
footprint PRS11S (PRS11S - 11 mm SMD Potentiometer)
pins: 1, 2, 3

## PTV09A-2015F-Bxxx
designator R?, comment 10 кОм PTV09A-2015F-Bxxx
PTV09 Series - 9 mm Potentiometer / Vertical/Side Mount, / Bushingless, 10 mm Height; Manufacturer: Bourns; Value: 10 кОм; Tolerance: ±20%; VDC: 20 В; Power: 1/20 Вт; PartNumber: PTV09A-2015F-Bxxx; ComponentLink1Description: DataSheet; ComponentLink1URL: https://www.bourns.com/docs/Product-Datasheets/PTV09.pdf
footprint PTV09A-2015F (Bourns Vertical/Side Mount,  Bushingless, 10 mm Height)
pins: 1, 2, 3

## QCN-12A+
designator WT?
Power Splitter/Combiner; Manufacturer: Mini-Circuits; PartNumber: QCN-12A+; ComponentLink1Description: Product Page; ComponentLink1URL: https://www.minicircuits.com/WebStore/dashboard.html?model=QCN-12A%2B; ComponentLink2Description: DataSheet; ComponentLink2URL: https://www.minicircuits.com/WebStore/dashboardPdf?model=QCN-12A%2B
footprint FV1206-1 (Mini-Circuits case FV1206-1)
pins: 1 SUM, 2 GND, 3 Term, 4 PORT 1, 5 GND, 6 PORT 2

## QCN-25+
designator WT?
Power Splitter/Combiner; Manufacturer: Mini-Circuits; PartNumber: QCN-25+; ComponentLink1Description: Product Page; ComponentLink1URL: https://www.minicircuits.com/WebStore/dashboard.html?model=QCN-25%2B; ComponentLink2Description: DataSheet; ComponentLink2URL: https://www.minicircuits.com/WebStore/dashboardPdf?model=QCN-25%2B
footprint FV1206-1 (Mini-Circuits case FV1206-1)
pins: 1 SUM, 2 GND, 3 Term, 4 PORT 1, 5 GND, 6 PORT 2

## QCN-34+
designator WT?
Power Splitter/Combiner; Manufacturer: Mini-Circuits; PartNumber: QCN-34+; ComponentLink1Description: Product Page; ComponentLink1URL: https://www.minicircuits.com/WebStore/dashboard.html?model=QCN-34%2B; ComponentLink2Description: DataSheet; ComponentLink2URL: https://www.minicircuits.com/WebStore/dashboardPdf?model=QCN-34%2B
footprint FV1206-1 (Mini-Circuits case FV1206-1)
pins: 1 SUM, 2 GND, 3 Term, 4 PORT 1, 5 GND, 6 PORT 2

## QCN-45+
designator WT?
Power Splitter/Combiner; Manufacturer: Mini-Circuits; PartNumber: QCN-45+; ComponentLink1Description: Product Page; ComponentLink1URL: https://www.minicircuits.com/WebStore/dashboard.html?model=QCN-45%2B; ComponentLink2Description: DataSheet; ComponentLink2URL: https://www.minicircuits.com/WebStore/dashboardPdf?model=QCN-45%2B
footprint FV1206-1 (Mini-Circuits case FV1206-1)
pins: 1 SUM, 2 GND, 3 Term, 4 PORT 1, 5 GND, 6 PORT 2

## RCBT-63H+
designator T?
Bias Tee 50Ω Wideband 900 MHz to 6 GHz; Manufacturer: Mini-Circuits; PartNumber: RCBT-63H+; ComponentLink1Description: Product Page; ComponentLink1URL: https://www.minicircuits.com/WebStore/dashboard.html?model=RCBT-63H%2B; ComponentLink2Description: DataSheet; ComponentLink2URL: https://www.minicircuits.com/WebStore/dashboardPdf?model=RCBT-63H%2B
footprint TT1224-2 (Mini-Circuits case TT1224-2)
pins: 1 DC, 2 GND, 3 RF, 4 RF+DC, 5 GND, 6 GND

## Resistor
designator R?, comment 10 Ом
Resistor, generic; Value: 10 Ом; PartNumber: *; Tolerance: *; Power: *; DCV: *; Manufacturer: *; Package: 0402
footprint RESC60X30X28L15N (Resistor, Chip; 0.60 mm L X 0.30 mm W X 0.28 mm H body)
footprint RESC100X50X40L25N (Resistor, Chip; 1.00 mm L X 0.50 mm W X 0.40 mm H body)
footprint RESC160X80X60L30N (Resistor, Chip; 1.60 mm L X 0.80 mm W X 0.60 mm H body)
footprint RESC200X125X65L40N (Resistor, Chip; 2.00 mm L X 1.25 mm W X 0.65 mm H body)
footprint RESC310X160X65L40N (Resistor, Chip; 3.10 mm L X 1.60 mm W X 0.65 mm H body)
footprint RESC310X260X65L50N (Resistor, Chip; 3.10 mm L X 2.60 mm W X 0.65 mm H body)
footprint RESC450X320X70L50N (Resistor, Chip; 4.50 mm L X 3.20 mm W X 0.70 mm H body)
footprint RESC500X250X65L50N (Resistor, Chip; 5.00 mm L X 2.50 mm W X 0.65 mm H body)
footprint RESC635X310X65L50N (Resistor, Chip; 6.35 mm L X 3.10 mm W X 0.65 mm H body)
footprint RESC160X320X60L45N (Resistor, Chip; 1.60 mm L X 3.20 mm W X 0.60 mm H body)
footprint RESC310X460X65L40N (Resistor, Chip; 3.10 mm L X 4.60 mm W X 0.65 mm H body)
pins: 1, 2

## Resistor0201
designator R?, comment 10 Ом
Resistor, chip, 0201; Value: 10 Ом; PartNumber: *; Tolerance: *; Power: *; DCV: *; Manufacturer: *; Package: 0201
footprint RESC60X30X28L15N (Resistor, Chip; 0.60 mm L X 0.30 mm W X 0.28 mm H body)
pins: 1, 2

## Resistor0402
designator R?, comment 10 Ом
Resistor, chip, 0402; Value: 10 Ом; PartNumber: *; Tolerance: *; Power: *; DCV: *; Manufacturer: *; Package: 0402
footprint RESC100X50X40L25N (Resistor, Chip; 1.00 mm L X 0.50 mm W X 0.40 mm H body)
pins: 1, 2

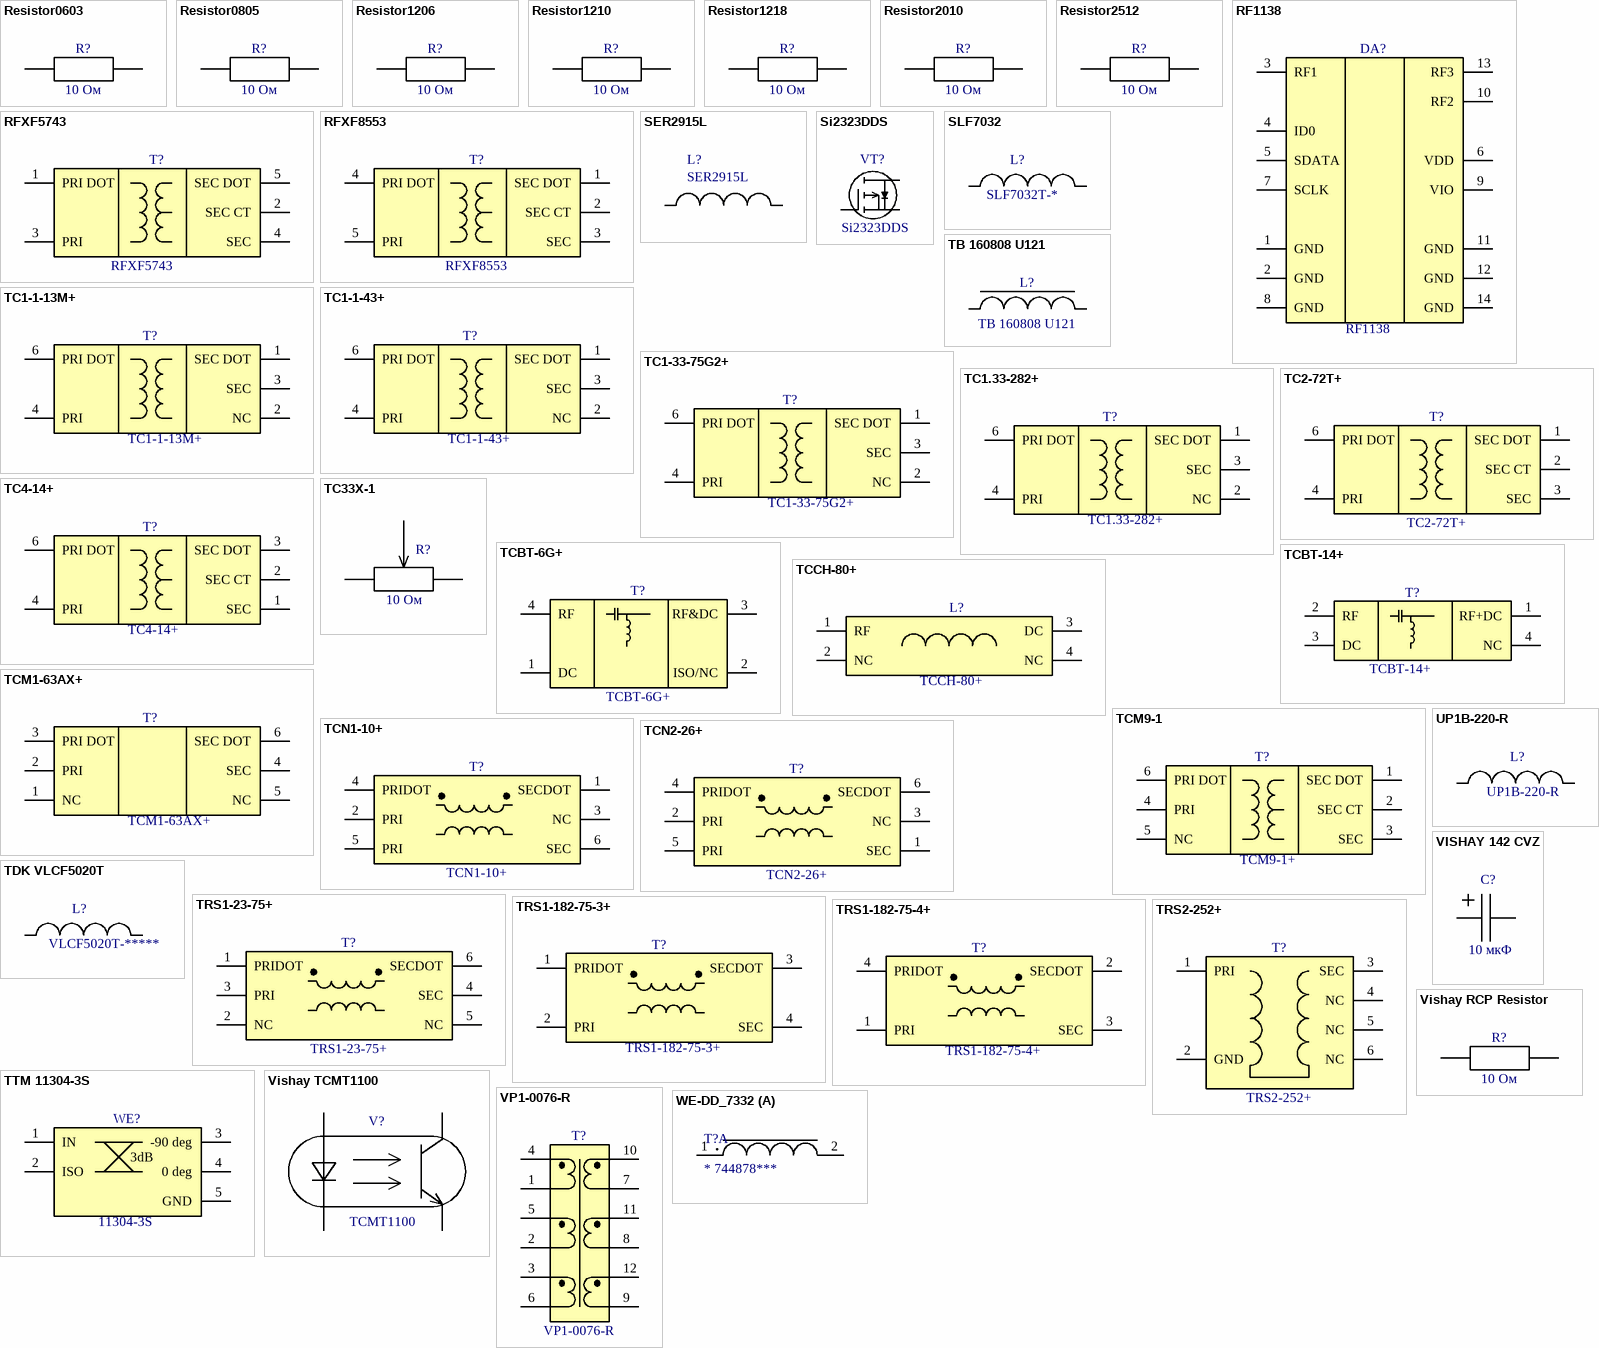
[diagram p14: symbols Resistor0603 to WE-DD_7332]

## Resistor0603
designator R?, comment 10 Ом
Resistor, chip, 0603; Value: 10 Ом; PartNumber: *; Tolerance: *; Power: *; DCV: *; Manufacturer: *; Package: 0603
footprint RESC160X80X60L30N (Resistor, Chip; 1.60 mm L X 0.80 mm W X 0.60 mm H body)
pins: 1, 2

## Resistor0805
designator R?, comment 10 Ом
Resistor, chip, 0805; Value: 10 Ом; PartNumber: *; Tolerance: *; Power: *; DCV: *; Manufacturer: *; Package: 0805
footprint RESC200X125X65L40N (Resistor, Chip; 2.00 mm L X 1.25 mm W X 0.65 mm H body)
pins: 1, 2

## Resistor1206
designator R?, comment 10 Ом
Resistor, chip, 1206; Value: 10 Ом; PartNumber: *; Tolerance: *; Power: *; DCV: *; Manufacturer: *; Package: 1206
footprint RESC310X160X65L40N (Resistor, Chip; 3.10 mm L X 1.60 mm W X 0.65 mm H body)
pins: 1, 2

## Resistor1210
designator R?, comment 10 Ом
Resistor, chip, 1210; Value: 10 Ом; PartNumber: *; Tolerance: *; Power: *; DCV: *; Manufacturer: *; Package: 1210
footprint RESC310X260X65L50N (Resistor, Chip; 3.10 mm L X 2.60 mm W X 0.65 mm H body)
pins: 1, 2

## Resistor1218
designator R?, comment 10 Ом
Resistor, chip, 1218; Value: 10 Ом; PartNumber: *; Tolerance: *; Power: *; DCV: *; Manufacturer: *; Package: 1218
footprint RESC310X460X65L40N (Resistor, Chip; 3.10 mm L X 4.60 mm W X 0.65 mm H body)
pins: 1, 2

## Resistor2010
designator R?, comment 10 Ом
Resistor, chip, 1210; Value: 10 Ом; PartNumber: *; Tolerance: *; Power: *; DCV: *; Manufacturer: *; Package: 1210
footprint RESC500X250X65L50N (Resistor, Chip; 5.00 mm L X 2.50 mm W X 0.65 mm H body)
pins: 1, 2

## Resistor2512
designator R?, comment 10 Ом
Resistor, chip, 2512; Value: 10 Ом; PartNumber: *; Tolerance: *; Power: *; DCV: *; Manufacturer: *; Package: 2512
footprint RESC635X310X65L50N (Resistor, Chip; 6.35 mm L X 3.10 mm W X 0.65 mm H body)
pins: 1, 2

## RF1138
designator DA?
5 bit Tunable Capacitor with Switch; Manufacturer: Qorvo; PartNumber: RF1138
footprint BGA14CP40_4X5_158X198X60B26N (Ball Grid Array (BGA), 0.40 mm pitch, rect.; 14 pin, 1.58 mm L X 1.98 mm W X 0.602 mm H body)
pins: 1 GND, 2 GND, 3 RF1, 4 ID0, 5 SDATA, 6 VDD, 7 SCLK, 8 GND, 9 VIO, 10 RF2, 11 GND, 12 GND, 13 RF3, 14 GND

## RFXF5743
designator T?
1:3 SMT TRANSFORMER 75 Ohm; Manufacturer: MiniRF; PartNumber: RFXF5743; ComponentLink1Description: ProductPage; ComponentLink1URL: https://www.rfmw.com/products/detail/rfxf5743-minirf/34935/; ComponentLink2Description: DataSheet; ComponentLink2URL: http://www.minirf.com/pdf/transformers/RFXF5743DS.pdf
footprint RFXF5743 (Mini RF RFXF5743 Case S20)
pins: 1 PRI DOT, 2 SEC CT, 3 PRI, 4 SEC, 5 SEC DOT

## RFXF8553
designator T?
1:4 SMT TRANSFORMER 500 MHz to 2500MHz; Manufacturer: MiniRF; PartNumber: RFXF8553; ComponentLink1Description: ProductPage; ComponentLink1URL: https://www.rfmw.com/products/detail/rfxf8553-minirf/34885/; ComponentLink2Description: DataSheet; ComponentLink2URL: http://www.minirf.com/pdf/transformers/RFXF8553DS.pdf
footprint RFXF5743 (Mini RF RFXF5743 Case S20)
pins: 1 SEC DOT, 2 SEC CT, 3 SEC, 4 PRI DOT, 5 PRI

## SER2915L
designator L?
Shielded Power Inductor; Manufacturer: Coilcraft; Tolerance: ±10%; PartNumber: SER2915L; Value: *; DCR: *; ComponentLink1Description: Product Page; ComponentLink1URL: https://www.coilcraft.com/en-us/products/power/shielded-inductors/high-current-flat-wire/ser/ser29xx/; SRF: *; ISAT: *; IRMS: *
footprint CoilCraft_SER2915L (CoilCraft Power Inductor)
pins: 1, 2

## Si2323DDS
designator VT?
P-Channel 20-V (D-S) MOSFET; Manufacturer: Vishay; PartNumber: Si2323DDS; ComponentLink1Description: Product Page; ComponentLink1URL: https://www.vishay.com/en/product/64004/; ComponentLink2Description: DataSheet; ComponentLink2URL: https://www.vishay.com/docs/64004/si2323dds.pdf
footprint SOT23-3P95_237X112L50X42N (Small Outline Transistor (SOT23), 0.95 mm pitch; 3 pin, 2.92 mm L X 1.30 mm W X 1.12 mm H body)
pins: 1 G, 2 S, 3 D

## SLF7032
designator L?, comment SLF7032T-*
Inductors for power circuits Wound ferrite SLF series; Manufacturer: TDK; Tolerance: ±20%; PartNumber: SLF7032T-*; Value: *; DCR: *; ISAT: *; ComponentLink1Description: DataSheet; ComponentLink1URL: https://product.tdk.com/info/en/catalog/datasheets/inductor_commercial_power_slf7032_en.pdf
footprint SLF7032 (TDK SLF7032 type)
pins: 1, 2

## TB 160808 U121
designator L?
Multilayer Ferrite Chip Bead; Manufacturer: Frontier; Value: 100 мОм/800 мА; PartNumber: TB 160808 U121; DCR: *; ISAT: *
footprint BEADC160X80X100L30N (Ferrite Bead, Chip; 1.60 mm L X 0.80 mm W X 1.00 mm H body)
pins: 1, 2

## TC1-1-13M+
designator T?
RF Transformer 50Ω 4.5 to 3000 MHz; Manufacturer: Mini-Circuits; PartNumber: TC1-1-13M+; ComponentLink1Description: Product Page; ComponentLink1URL: https://www.minicircuits.com/WebStore/dashboard.html?model=TC1-1-13M%2B; ComponentLink2Description: DataSheet; ComponentLink2URL: https://www.minicircuits.com/WebStore/dashboardPdf?model=TC1-1-13M%2B
footprint AT224-1A (Mini-Circuirts case AT224-1A)
pins: 1 SEC DOT, 2 NC, 3 SEC, 4 PRI, 6 PRI DOT

## TC1-1-43+
designator T?
1:1 CORE & WIRE Transformer, 650 - 4000 MHz, 50Ω; Manufacturer: Mini-Circuits; PartNumber: TC1-1-43+; ComponentLink1Description: Product Page; ComponentLink1URL: https://www.minicircuits.com/WebStore/dashboard.html?model=TC1-1-43%2B; ComponentLink2Description: DataSheet; ComponentLink2URL: https://www.minicircuits.com/WebStore/dashboardPdf?model=TC1-1-43%2B
footprint AT224-1A (Mini-Circuirts case AT224-1A)
pins: 1 SEC DOT, 2 NC, 3 SEC, 4 PRI, 6 PRI DOT

## TC1-33-75G2+
designator T?
1:1 CORE & WIRE Transformer, 5 - 3000 MHz, 75Ω; Manufacturer: Mini-Circuits; PartNumber: TC1-33-75G2+; ComponentLink1Description: Product Page; ComponentLink1URL: https://www.minicircuits.com/WebStore/dashboard.html?model=TC1-33-75G2%2B; ComponentLink2Description: DataSheet; ComponentLink2URL: https://www.minicircuits.com/WebStore/dashboardPdf?model=TC1-33-75G2%2B
footprint AT224-3 (Mini-Circuits)
pins: 1 SEC DOT, 2 NC, 3 SEC, 4 PRI, 6 PRI DOT

## TC1.33-282+
designator T?
1:1.33 CORE & WIRE Transformer, 5 - 2800 MHz, 75Ω; Manufacturer: Mini-Circuits; PartNumber: TC1.33-282+; ComponentLink1Description: Product Page; ComponentLink1URL: https://www.minicircuits.com/WebStore/dashboard.html?model=TC1.33-282%2B; ComponentLink2Description: DataSheet; ComponentLink2URL: https://www.minicircuits.com/WebStore/dashboardPdf?model=TC1.33-282%2B
footprint AT224-1A (Mini-Circuirts case AT224-1A)
pins: 1 SEC DOT, 2 NC, 3 SEC, 4 PRI, 6 PRI DOT

## TC2-72T+
designator T?
1:2 CORE & WIRE Transformer, 10 - 700 MHz, 50Ω; Manufacturer: Mini-Circuits; PartNumber: TC2-72T+; ComponentLink1Description: Product Page; ComponentLink1URL: https://www.minicircuits.com/WebStore/dashboard.html?model=TC2-72T%2B; ComponentLink2Description: DataSheet; ComponentLink2URL: https://www.minicircuits.com/WebStore/dashboardPdf?model=TC2-72T%2B
footprint AT1521 (Mini-Circuirts case AT1521)
pins: 1 SEC DOT, 2 SEC CT, 3 SEC, 4 PRI, 6 PRI DOT

## TC4-14+
designator T?
RF Transformer 50Ω 200 to 1400 MHz; Manufacturer: Mini-Circuits; PartNumber: TC4-14+; ComponentLink1Description: Product Page; ComponentLink1URL: https://www.minicircuits.com/WebStore/dashboard.html?model=TC4-14%2B; ComponentLink2Description: DataSheet; ComponentLink2URL: https://www.minicircuits.com/WebStore/dashboardPdf?model=TC4-14%2B
footprint AT224-1 (Mini-Circuirts case AT224-1)
pins: 1 SEC, 2 SEC CT, 3 SEC DOT, 4 PRI, 6 PRI DOT

## TC33X-1
designator R?, comment 10 Ом
TC33 - 3 mm SMD Trimpot® Trimming Potentiometer; PartNumber: TC33X-1; Manufacturer: Bourns; Power: 0,15 Вт; Tolerance: ±25%; DCV: 50 В; Value: 10 Ом; ComponentLink1Description: DataSheet; ComponentLink1URL: https://www.bourns.com/docs/Product-Datasheets/TC33.pdf
footprint bourns_TC33X-1 (Trimmer Potenciometer, Bourns,  3.6 mm X 3.8 mm X 1.2 mm)
pins: 1, 2, 3

## TCBT-6G+
designator T?
BIAS TEE / SURF MT / RoHS; Manufacturer: Mini-Circuits; PartNumber: TCBT-6G+; ComponentLink1Description: Product Page; ComponentLink1URL: https://www.minicircuits.com/WebStore/dashboard.html?model=TCBT-6G%2B; ComponentLink2Description: DataSheet; ComponentLink2URL: https://www.minicircuits.com/WebStore/dashboardPdf?model=TCBT-6G%2B
footprint GU1604 (Mini-Circuits case GU1604)
pins: 1 DC, 2 ISO/NC, 3 RF&DC, 4 RF

## TCBT-14+
designator T?
BIAS TEE / SURF MT / RoHS/ 50Ω Wideband 10 MHz to 10 GHz; Manufacturer: Mini-Circuits; PartNumber: TCBT-14+; ComponentLink1Description: Product Page; ComponentLink1URL: https://www.minicircuits.com/WebStore/dashboard.html?model=TCBT-14%2B; ComponentLink2Description: DataSheet; ComponentLink2URL: https://www.minicircuits.com/WebStore/dashboardPdf?model=TCBT-14%2B
footprint GU1414 (Mini-Circuits case GU1414)
pins: 1 RF+DC, 2 RF, 3 DC, 4 NC

## TCCH-80+
designator L?
RF Choke 50Ω 50 to 8200 MHz; Manufacturer: Mini-Circuits; PartNumber: TCCH-80+; ComponentLink1Description: Product Page; ComponentLink1URL: https://www.minicircuits.com/WebStore/dashboard.html?model=TCCH-80%2B; ComponentLink2Description: DataSheet; ComponentLink2URL: https://www.minicircuits.com/WebStore/dashboardPdf?model=TCCH-80%2B
footprint GU1604 (Mini-Circuits case GU1604)
pins: 1 RF, 2 NC, 3 DC, 4 NC

## TCM1-63AX+
designator T?
RF Transformer 10 to 6000 MHz; Manufacturer: Mini-Circuits; PartNumber: TCM1-63AX+; ComponentLink1Description: Product Page; ComponentLink1URL: https://www.minicircuits.com/WebStore/dashboard.html?model=TCM1-63AX%2B; ComponentLink2Description: DataSheet; ComponentLink2URL: https://www.minicircuits.com/WebStore/dashboardPdf?model=TCM1-63AX%2B
footprint DB1627 (Mini-Circuirts case DB1627)
pins: 1 NC, 2 PRI, 3 PRI DOT, 4 SEC, 5 NC, 6 SEC DOT

## TCM9-1
designator T?, comment TCM9-1+
RF Transformer 50Ω 2 to 280 MHz; Manufacturer: Mini-Circuits; PartNumber: TCM9-1+; ComponentLink1Description: Product Page; ComponentLink1URL: https://www.minicircuits.com/WebStore/dashboard.html?model=TCM9-1%2B; ComponentLink2Description: DataSheet; ComponentLink2URL: https://www.minicircuits.com/WebStore/dashboardPdf?model=TCM9-1%2B
footprint DB714 (Mini-Circuirts case DB714)
pins: 1 SEC DOT, 2 SEC CT, 3 SEC, 4 PRI, 5 NC, 6 PRI DOT

## TCN1-10+
designator T?
1:1 LTCC Transformer, 680 - 1050 MHz, 50Ω; Manufacturer: Mini-Circuits; PartNumber: TCN1-10+; ComponentLink1Description: ProductPage; ComponentLink1URL: https://www.minicircuits.com/WebStore/dashboard.html?model=TCN1-10%2B; ComponentLink2Description: DataSheet; ComponentLink2URL: https://www.minicircuits.com/WebStore/dashboardPdf?model=TCN1-10%2B
footprint FV1206-1 (Mini-Circuits case FV1206-1)
pins: 1 SECDOT, 2 PRI, 3 NC, 4 PRIDOT, 5 PRI, 6 SEC

## TCN2-26+
designator T?
1:2 LTCC Transformer, 1600 - 2600 MHz, 50Ω; Manufacturer: Mini-Circuits; PartNumber: TCN2-26+; ComponentLink1Description: ProductPage; ComponentLink1URL: https://www.minicircuits.com/WebStore/dashboard.html?model=TCN2-26%2B; ComponentLink2Description: DataSheet; ComponentLink2URL: https://www.minicircuits.com/WebStore/dashboardPdf?model=TCN2-26%2B
footprint FV1206-1 (Mini-Circuits case FV1206-1)
pins: 1 SEC, 2 PRI, 3 NC, 4 PRIDOT, 5 PRI, 6 SECDOT

## TDK VLCF5020T
designator L?, comment VLCF5020T-*****
TDK Inductors for power circuits, Wound ferrite, VLCF series; PartNumber: VLCF5020T-*****; Value: *; DCR: *; ISAT: *; ComponentLink1Description: Product Page; ComponentLink1URL: https://product.tdk.com/en/search/inductor/inductor/smd/catalog; Manufacturer: TDK; Tolerance: *; IRMS: *
footprint TDK VLCF5020T (TDK 5x5x2 WOUND FERRITE)
pins: 1, 2

## TRS1-23-75+
designator T?
1:1 CORE & WIRE Transformer, 10 - 2200 MHz, 75Ω; Manufacturer: Mini-Circuits; PartNumber: TRS1-23-75+; ComponentLink1Description: ProductPage; ComponentLink1URL: https://www.minicircuits.com/WebStore/dashboard.html?model=TRS1-23-75%2B; ComponentLink2Description: DataSheet; ComponentLink2URL: https://www.minicircuits.com/WebStore/dashboardPdf?model=TRS1-23-75%2B
footprint AT577-1 (Mini-Circuirts case AT577-1)
pins: 1 PRIDOT, 2 NC, 3 PRI, 4 SEC, 5 NC, 6 SECDOT

## TRS1-182-75-3+
designator T?
1:1 CORE & WIRE Transformer, 10 - 1800 MHz, 75Ω; Manufacturer: Mini-Circuits; PartNumber: TRS1-182-75-3+; ComponentLink1Description: ProductPage; ComponentLink1URL: https://www.minicircuits.com/WebStore/dashboard.html?model=TRS1-182-75-3%2B; ComponentLink2Description: DataSheet; ComponentLink2URL: https://www.minicircuits.com/WebStore/dashboardPdf?model=TRS1-182-75-3%2B
footprint TT1618-2 (Mini-Circuits CASE TT1618-2)
pins: 1 PRIDOT, 2 PRI, 3 SECDOT, 4 SEC

## TRS1-182-75-4+
designator T?
1:1 CORE & WIRE Transformer, 10 - 1800 MHz, 75Ω; Manufacturer: Mini-Circuits; PartNumber: TRS1-182-75-4+; ComponentLink1Description: ProductPage; ComponentLink1URL: https://www.minicircuits.com/WebStore/dashboard.html?model=TRS1-182-75-4%2B; ComponentLink2Description: DataSheet; ComponentLink2URL: https://www.minicircuits.com/WebStore/dashboardPdf?model=TRS1-182-75-4%2B
footprint TT1618-1 (Mini-Circuits case TT1618-1)
pins: 1 PRI, 2 SECDOT, 3 SEC, 4 PRIDOT

## TRS2-252+
designator T?
RF Transformer 100 to 50Ω 4 to 2500 MHz; Manufacturer: Mini-Circuits; PartNumber: TRS2-252+; ComponentLink1Description: ProductPage; ComponentLink1URL: https://www.minicircuits.com/WebStore/dashboard.html?model=TRS2-252%2B; ComponentLink2Description: DataSheet; ComponentLink2URL: https://www.minicircuits.com/WebStore/dashboardPdf?model=TRS2-252%2B
footprint AT577 (Open style, ceramic base)
pins: 1 PRI, 2 GND, 3 SEC, 4 NC, 5 NC, 6 NC

## TTM 11304-3S
designator WE?, comment 11304-3S
Hybrid Coupler 3 dB, 90°, 0.5-1 GHz; Manufacturer: TTM; PartNumber: 11304-3S; ComponentLink1Description: Product Page; ComponentLink1URL: https://www.ttm.com/en/solutions/rfs-components/xinger-components/90-degree-hybrid-couplers; ComponentLink2Description: DataSheet; ComponentLink2URL: https://cdn.ttm.com/repository/products/wireless-xinger/3db-hybrid-couplers/11304-3S/11304-3S.pdf
footprint TTM 11304-3S (TTM Xinger 0.65 x 0.48)
pins: 1 IN, 2 ISO, 3 -90 deg, 4 0 deg, 5 GND
text: 3dB

## UP1B-220-R
designator L?
Power Inductors; Manufacturer: Eaton; Value: 22 мкГн; IRMS: 1 А; ISAT: 1,2 А; DCR: 250 мОм; PartNumber: UP1B-220-R; ComponentLink1Description: Product Page; ComponentLink1URL: https://www.eaton.com/us/en-us/catalog/electronic-components/up-inductor.html
footprint UP1B (UP1B CASE Coiltronics)
pins: 1, 2